# Altium footprint library JEDEC.PcbLib: 40 footprints (part 1 of 3)
Each footprint in its own frame and in the unit in brackets; x right, y up, seen from the top. Pads: shape width x height; smd on the part's side, far side on the other; paste and mask are expansions set on the pad; w line width, h text height; cw(c..) or ccw(c..) is an arc to the next point about the centre after c.
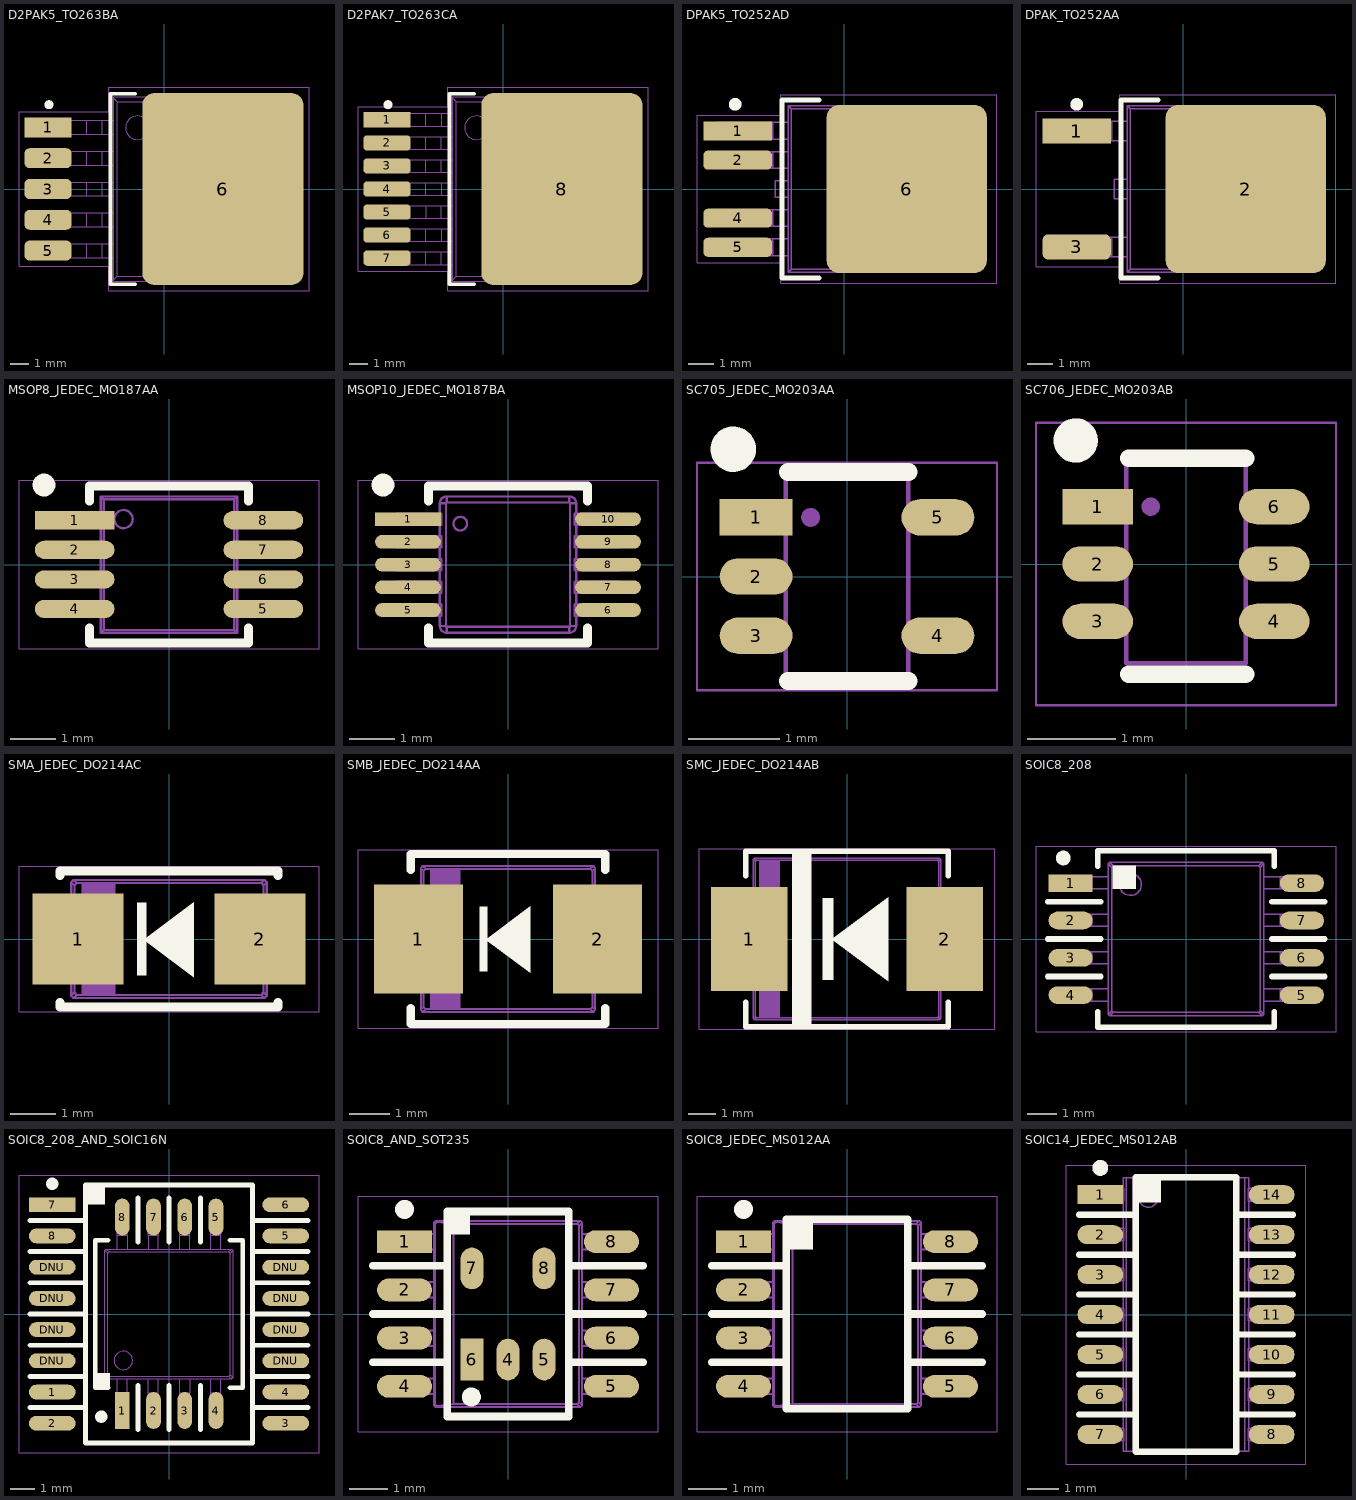
[diagram p0: the footprints below, top view; thin cyan lines are the x and y axes]

## D2PAK5_TO263BA [mm] "D2-PAK, 6-Pads, Body 7.80x8.61mm (max)"
height 4.825
pads (6):
  rect 2.6x1.1 smd: 1(-6.4,3.4)
  rrect50% 2.6x1.1 smd: 2(-6.4,1.7) 3(-6.4,0) 4(-6.4,-1.7) 5(-6.4,-3.4)
  rrect15% 8.9x10.6 smd paste-10: 6(3.25,0)
Top Overlay:
  circle w0.25: c-6.35,4.65 r0.125
  lines w0.2: -1.6,-5.25 -2.95,-5.25 -2.95,5.25 -1.6,5.25
Top Paste:
  rectangle: -0.7,0.9 0.3,1.9
  rectangle: -0.7,-0.5 0.3,0.5
  region: 0.7,0.5 0.7,-0.5 1.7,-0.5 1.7,0.5
  region: 0.7,1.9 0.7,0.9 1.7,0.9 1.7,1.9
  region: 2.1,1.9 2.1,0.9 3.1,0.9 3.1,1.9
  region: 2.1,0.5 2.1,-0.5 3.1,-0.5 3.1,0.5
  region: 3.5,1.9 3.5,0.9 4.5,0.9 4.5,1.9
  region: 3.5,0.5 3.5,-0.5 4.5,-0.5 4.5,0.5
  region: 4.9,1.9 4.9,0.9 5.9,0.9 5.9,1.9
  region: 4.9,0.5 4.9,-0.5 5.9,-0.5 5.9,0.5
  region: 6.3,1.9 6.3,0.9 7.3,0.9 7.3,1.9
  region: 6.3,0.5 6.3,-0.5 7.3,-0.5 7.3,0.5
  rectangle: -0.7,2.3 0.3,3.3
  region: 0.7,3.3 0.7,2.3 1.7,2.3 1.7,3.3
  region: 2.1,3.3 2.1,2.3 3.1,2.3 3.1,3.3
  region: 3.5,3.3 3.5,2.3 4.5,2.3 4.5,3.3
  region: 4.9,3.3 4.9,2.3 5.9,2.3 5.9,3.3
  region: 6.3,3.3 6.3,2.3 7.3,2.3 7.3,3.3
  rectangle: -0.7,3.7 0.3,4.7
  region: 0.7,4.7 0.7,3.7 1.7,3.7 1.7,4.7
  region: 2.1,4.7 2.1,3.7 3.1,3.7 3.1,4.7
  region: 3.5,4.7 3.5,3.7 4.5,3.7 4.5,4.7
  region: 4.9,4.7 4.9,3.7 5.9,3.7 5.9,4.7
  region: 6.3,4.7 6.3,3.7 7.3,3.7 7.3,4.7
  region: 7.3,-0.9 6.3,-0.9 6.3,-1.9 7.3,-1.9
  region: 5.9,-1.9 5.9,-0.9 4.9,-0.9 4.9,-1.9
  region: 4.5,-1.9 4.5,-0.9 3.5,-0.9 3.5,-1.9
  region: 3.1,-1.9 3.1,-0.9 2.1,-0.9 2.1,-1.9
  region: 1.7,-1.9 1.7,-0.9 0.7,-0.9 0.7,-1.9
  region: 0.3,-1.9 0.3,-0.9 -0.7,-0.9 -0.7,-1.9
  region: 7.3,-2.3 6.3,-2.3 6.3,-3.3 7.3,-3.3
  region: 5.9,-3.3 5.9,-2.3 4.9,-2.3 4.9,-3.3
  region: 4.5,-3.3 4.5,-2.3 3.5,-2.3 3.5,-3.3
  region: 3.1,-3.3 3.1,-2.3 2.1,-2.3 2.1,-3.3
  region: 1.7,-3.3 1.7,-2.3 0.7,-2.3 0.7,-3.3
  region: 0.3,-3.3 0.3,-2.3 -0.7,-2.3 -0.7,-3.3
  region: 7.3,-3.7 6.3,-3.7 6.3,-4.7 7.3,-4.7
  region: 5.9,-4.7 5.9,-3.7 4.9,-3.7 4.9,-4.7
  region: 4.5,-4.7 4.5,-3.7 3.5,-3.7 3.5,-4.7
  region: 3.1,-4.7 3.1,-3.7 2.1,-3.7 2.1,-4.7
  region: 1.7,-4.7 1.7,-3.7 0.7,-3.7 0.7,-4.7
  region: 0.3,-4.7 0.3,-3.7 -0.7,-3.7 -0.7,-4.7
Top Courtyard:
  lines w0.025: -8,-4.25 -8,4.25 -3.05,4.25 -3.05,5.6 8,5.6 8,-5.6 -3.05,-5.6 -3.05,-4.25 -8,-4.25
Top Assembly:
  circle w0.05: c-1.473,3.378 r0.65
  lines w0.05: -5.883,-3.785 -5.883,-3.023 ; -5.883,-2.083 -5.883,-1.321 ; -5.883,-0.381 -5.883,0.381 ; -5.883,1.321 -5.883,2.083 ; -5.883,3.023 -5.883,3.785 ; -5.485,-3.785 -5.485,-3.023 ; -5.485,-2.083 -5.485,-1.321 ; -5.485,-0.381 -5.485,0.381 ; -5.485,1.321 -5.485,2.083 ; -5.485,3.023 -5.485,3.785 ; -4.267,-3.785 -4.267,-3.023 ; -4.267,-2.083 -4.267,-1.321 ; -4.267,-0.381 -4.267,0.381 ; -4.267,1.321 -4.267,2.083 ; -4.267,3.023 -4.267,3.785 ; -3.401,-3.785 -3.401,-3.023 ; -3.401,-2.083 -3.401,-1.321 ; -3.401,-0.381 -3.401,0.381 ; -3.401,1.321 -3.401,2.083 ; -3.401,3.023 -3.401,3.785 ; -2.773,-5.003 -2.586,-4.816 ; -2.773,-3.785 -7.322,-3.785 -7.322,-3.023 -2.773,-3.023 ; -2.773,-2.083 -7.322,-2.083 -7.322,-1.321 -2.773,-1.321 ; -2.773,-0.381 -7.322,-0.381 -7.322,0.381 -2.773,0.381 ; -2.773,1.321 -7.322,1.321 -7.322,2.083 -2.773,2.083 ; -2.773,3.023 -7.322,3.023 -7.322,3.785 -2.773,3.785 ; -2.773,5.003 -2.586,4.816 ; 6.242,-4.666 6.722,-4.666 7.322,-3.766 7.322,3.766 6.722,4.666 6.242,4.666 ; -2.586,-4.816 5.759,-4.816 ; -2.586,-4.816 -2.586,4.816 ; -2.586,4.816 5.759,4.816 ; 5.759,-4.816 6.023,-5.08 ; 5.759,-4.816 5.759,4.816 ; 5.759,4.816 6.023,5.08 ; 6.023,-5.08 6.242,-4.861 6.242,4.861 6.023,5.08 ; 6.023,-5.08 -2.773,-5.08 -2.773,5.08 6.023,5.08
  text ".Designator" at -5.862,-0.676 h3
3D body "D2PAK5_TO263BA.x_t": height 4.83, standoff 0, extent -7.257,-5.08 7.387,5.08

## D2PAK7_TO263CA [mm] "D2-PAK, 8-Pads, Body 7.80x8.61mm (max)"
height 4.825
pads (8):
  rect 2.6x0.85 smd: 1(-6.4,3.81)
  rrect50% 2.6x0.85 smd: 2(-6.4,2.54) 3(-6.4,1.27) 4(-6.4,0) 5(-6.4,-1.27) 6(-6.4,-2.54) 7(-6.4,-3.81)
  rrect15% 8.9x10.6 smd paste-10: 8(3.25,0)
Top Overlay:
  circle w0.25: c-6.35,4.65 r0.125
  lines w0.2: -1.6,-5.25 -2.95,-5.25 -2.95,5.25 -1.6,5.25
Top Paste:
  region: 0.3,-4.7 0.3,-3.7 -0.7,-3.7 -0.7,-4.7
  region: 1.7,-4.7 1.7,-3.7 0.7,-3.7 0.7,-4.7
  region: 3.1,-4.7 3.1,-3.7 2.1,-3.7 2.1,-4.7
  region: 4.5,-4.7 4.5,-3.7 3.5,-3.7 3.5,-4.7
  region: 5.9,-4.7 5.9,-3.7 4.9,-3.7 4.9,-4.7
  region: 7.3,-3.7 6.3,-3.7 6.3,-4.7 7.3,-4.7
  region: 0.3,-3.3 0.3,-2.3 -0.7,-2.3 -0.7,-3.3
  region: 1.7,-3.3 1.7,-2.3 0.7,-2.3 0.7,-3.3
  region: 3.1,-3.3 3.1,-2.3 2.1,-2.3 2.1,-3.3
  region: 4.5,-3.3 4.5,-2.3 3.5,-2.3 3.5,-3.3
  region: 5.9,-3.3 5.9,-2.3 4.9,-2.3 4.9,-3.3
  region: 7.3,-2.3 6.3,-2.3 6.3,-3.3 7.3,-3.3
  region: 0.3,-1.9 0.3,-0.9 -0.7,-0.9 -0.7,-1.9
  region: 1.7,-1.9 1.7,-0.9 0.7,-0.9 0.7,-1.9
  region: 3.1,-1.9 3.1,-0.9 2.1,-0.9 2.1,-1.9
  region: 4.5,-1.9 4.5,-0.9 3.5,-0.9 3.5,-1.9
  region: 5.9,-1.9 5.9,-0.9 4.9,-0.9 4.9,-1.9
  region: 7.3,-0.9 6.3,-0.9 6.3,-1.9 7.3,-1.9
  region: 6.3,4.7 6.3,3.7 7.3,3.7 7.3,4.7
  region: 4.9,4.7 4.9,3.7 5.9,3.7 5.9,4.7
  region: 3.5,4.7 3.5,3.7 4.5,3.7 4.5,4.7
  region: 2.1,4.7 2.1,3.7 3.1,3.7 3.1,4.7
  region: 0.7,4.7 0.7,3.7 1.7,3.7 1.7,4.7
  rectangle: -0.7,3.7 0.3,4.7
  region: 6.3,3.3 6.3,2.3 7.3,2.3 7.3,3.3
  region: 4.9,3.3 4.9,2.3 5.9,2.3 5.9,3.3
  region: 3.5,3.3 3.5,2.3 4.5,2.3 4.5,3.3
  region: 2.1,3.3 2.1,2.3 3.1,2.3 3.1,3.3
  region: 0.7,3.3 0.7,2.3 1.7,2.3 1.7,3.3
  rectangle: -0.7,2.3 0.3,3.3
  region: 6.3,0.5 6.3,-0.5 7.3,-0.5 7.3,0.5
  region: 6.3,1.9 6.3,0.9 7.3,0.9 7.3,1.9
  region: 4.9,0.5 4.9,-0.5 5.9,-0.5 5.9,0.5
  region: 4.9,1.9 4.9,0.9 5.9,0.9 5.9,1.9
  region: 3.5,0.5 3.5,-0.5 4.5,-0.5 4.5,0.5
  region: 3.5,1.9 3.5,0.9 4.5,0.9 4.5,1.9
  region: 2.1,0.5 2.1,-0.5 3.1,-0.5 3.1,0.5
  region: 2.1,1.9 2.1,0.9 3.1,0.9 3.1,1.9
  region: 0.7,1.9 0.7,0.9 1.7,0.9 1.7,1.9
  region: 0.7,0.5 0.7,-0.5 1.7,-0.5 1.7,0.5
  rectangle: -0.7,-0.5 0.3,0.5
  rectangle: -0.7,0.9 0.3,1.9
Top Courtyard:
  lines w0.025: -8,-4.55 -3.05,-4.55 -3.05,-5.6 8,-5.6 8,5.6 -3.05,5.6 -3.05,4.55 -8,4.55 -8,-4.55
Top Assembly:
  circle w0.05: c-1.473,3.378 r0.65
  lines w0.05: -5.883,-4.166 -5.883,-3.454 ; -5.883,-2.896 -5.883,-2.184 ; -5.883,-1.626 -5.883,-0.914 ; -5.883,-0.356 -5.883,0.356 ; -5.883,0.914 -5.883,1.626 ; -5.883,2.184 -5.883,2.896 ; -5.883,3.454 -5.883,4.166 ; -5.485,-4.166 -5.485,-3.454 ; -5.485,-2.896 -5.485,-2.184 ; -5.485,-1.626 -5.485,-0.914 ; -5.485,-0.356 -5.485,0.356 ; -5.485,0.914 -5.485,1.626 ; -5.485,2.184 -5.485,2.896 ; -5.485,3.454 -5.485,4.166 ; -4.267,-4.166 -4.267,-3.455 ; -4.267,-2.896 -4.267,-2.184 ; -4.267,-1.626 -4.267,-0.914 ; -4.267,-0.356 -4.267,0.356 ; -4.267,0.914 -4.267,1.626 ; -4.267,2.184 -4.267,2.895 ; -4.267,3.454 -4.267,4.166 ; -3.401,-4.166 -3.401,-3.454 ; -3.401,-2.896 -3.401,-2.185 ; -3.401,-1.626 -3.401,-0.914 ; -3.401,-0.356 -3.401,0.356 ; -3.401,0.914 -3.401,1.626 ; -3.401,2.184 -3.401,2.896 ; -3.401,3.454 -3.401,4.166 ; -2.773,-5.003 -2.586,-4.816 ; -2.773,-4.166 -7.322,-4.166 -7.322,-3.454 -2.773,-3.454 ; -2.773,-2.895 -7.322,-2.896 -7.322,-2.184 -2.773,-2.185 ; -2.773,-1.626 -7.322,-1.626 -7.322,-0.914 -2.773,-0.914 ; -2.773,-0.356 -7.322,-0.356 -7.322,0.356 -2.773,0.356 ; -2.773,0.914 -7.322,0.914 -7.322,1.626 -2.773,1.626 ; -2.773,2.184 -7.322,2.184 -7.322,2.895 -2.773,2.896 ; -2.773,3.454 -7.322,3.454 -7.322,4.166 -2.773,4.166 ; -2.773,5.003 -2.586,4.816 ; 6.242,-4.666 6.722,-4.666 7.322,-3.766 7.322,3.766 6.722,4.666 6.242,4.666 ; -2.586,-4.816 -2.586,4.816 ; -2.586,-4.816 5.759,-4.816 ; -2.586,4.816 5.759,4.816 ; 5.759,-4.816 5.759,4.816 ; 5.759,-4.816 6.023,-5.08 ; 5.759,4.816 6.023,5.08 ; 6.023,-5.08 -2.773,-5.08 -2.773,5.08 6.023,5.08 ; 6.023,-5.08 6.242,-4.861 6.242,4.861 6.023,5.08
  text ".Designator" at -5.862,-0.676 h3
3D body "D2PAK7_TO263CA.x_t": height 4.83, standoff 0, extent -7.257,-5.08 7.387,5.08

## DPAK5_TO252AD [mm] "D-PAK, 5-Pads, Body 6.15x6.66mm (max)"
height 2.388
pads (5):
  rect 2.7x0.75 smd paste+0 mask+0.05: 1(-4.2,2.28)
  rrect50% 2.7x0.75 smd paste+0 mask+0.05: 2(-4.2,1.137) 4(-4.2,-1.149) 5(-4.2,-2.292)
  rrect15% 6.3x6.6 smd paste-50 mask+0.05: 6(2.45,0)
Top Overlay:
  circle w0.25: c-4.3,3.33 r0.125
  lines w0.2: -1,-3.5 -2.45,-3.5 -2.45,3.5 -1,3.5
Top Paste:
  region: 0.293,2.5 0.293,3.1 -0.307,3.1 -0.307,2.5
  region: 0.293,1.7 0.293,2.3 -0.307,2.3 -0.307,1.7
  region: 1.093,2.5 1.093,3.1 0.493,3.1 0.493,2.5
  region: 1.093,1.7 1.093,2.3 0.493,2.3 0.493,1.7
  region: 1.893,2.5 1.893,3.1 1.293,3.1 1.293,2.5
  region: 1.893,1.7 1.893,2.3 1.293,2.3 1.293,1.7
  region: 2.693,2.5 2.693,3.1 2.093,3.1 2.093,2.5
  region: 2.693,1.7 2.693,2.3 2.093,2.3 2.093,1.7
  region: 3.493,2.5 3.493,3.1 2.893,3.1 2.893,2.5
  region: 3.493,1.7 3.493,2.3 2.893,2.3 2.893,1.7
  region: 4.293,2.5 4.293,3.1 3.693,3.1 3.693,2.5
  region: 4.293,1.7 4.293,2.3 3.693,2.3 3.693,1.7
  region: 5.093,2.5 5.093,3.1 4.493,3.1 4.493,2.5
  region: 5.093,1.7 5.093,2.3 4.493,2.3 4.493,1.7
  region: 0.293,0.9 0.293,1.5 -0.307,1.5 -0.307,0.9
  region: 1.093,0.9 1.093,1.5 0.493,1.5 0.493,0.9
  region: 1.893,0.9 1.893,1.5 1.293,1.5 1.293,0.9
  region: 2.693,0.9 2.693,1.5 2.093,1.5 2.093,0.9
  region: 3.493,0.9 3.493,1.5 2.893,1.5 2.893,0.9
  region: 4.293,0.9 4.293,1.5 3.693,1.5 3.693,0.9
  region: 5.093,0.9 5.093,1.5 4.493,1.5 4.493,0.9
  region: 0.293,0.1 0.293,0.7 -0.307,0.7 -0.307,0.1
  region: 1.093,0.1 1.093,0.7 0.493,0.7 0.493,0.1
  region: 1.893,0.1 1.893,0.7 1.293,0.7 1.293,0.1
  region: 2.693,0.1 2.693,0.7 2.093,0.7 2.093,0.1
  region: 3.493,0.1 3.493,0.7 2.893,0.7 2.893,0.1
  region: 4.293,0.1 4.293,0.7 3.693,0.7 3.693,0.1
  region: 5.093,0.1 5.093,0.7 4.493,0.7 4.493,0.1
  region: 0.293,-0.7 0.293,-0.1 -0.307,-0.1 -0.307,-0.7
  region: 1.093,-0.7 1.093,-0.1 0.493,-0.1 0.493,-0.7
  region: 1.893,-0.7 1.893,-0.1 1.293,-0.1 1.293,-0.7
  region: 2.693,-0.7 2.693,-0.1 2.093,-0.1 2.093,-0.7
  region: 3.493,-0.7 3.493,-0.1 2.893,-0.1 2.893,-0.7
  region: 4.293,-0.7 4.293,-0.1 3.693,-0.1 3.693,-0.7
  region: 5.093,-0.7 5.093,-0.1 4.493,-0.1 4.493,-0.7
  region: 0.293,-1.5 0.293,-0.9 -0.307,-0.9 -0.307,-1.5
  region: 1.093,-1.5 1.093,-0.9 0.493,-0.9 0.493,-1.5
  region: 1.893,-1.5 1.893,-0.9 1.293,-0.9 1.293,-1.5
  region: 2.693,-1.5 2.693,-0.9 2.093,-0.9 2.093,-1.5
  region: 3.493,-1.5 3.493,-0.9 2.893,-0.9 2.893,-1.5
  region: 4.293,-1.5 4.293,-0.9 3.693,-0.9 3.693,-1.5
  region: 5.093,-1.5 5.093,-0.9 4.493,-0.9 4.493,-1.5
  region: 0.293,-2.3 0.293,-1.7 -0.307,-1.7 -0.307,-2.3
  region: 1.093,-2.3 1.093,-1.7 0.493,-1.7 0.493,-2.3
  region: 1.893,-2.3 1.893,-1.7 1.293,-1.7 1.293,-2.3
  region: 2.693,-2.3 2.693,-1.7 2.093,-1.7 2.093,-2.3
  region: 3.493,-2.3 3.493,-1.7 2.893,-1.7 2.893,-2.3
  region: 4.293,-2.3 4.293,-1.7 3.693,-1.7 3.693,-2.3
  region: 5.093,-2.3 5.093,-1.7 4.493,-1.7 4.493,-2.3
  region: 0.293,-3.1 0.293,-2.5 -0.307,-2.5 -0.307,-3.1
  region: 1.093,-3.1 1.093,-2.5 0.493,-2.5 0.493,-3.1
  region: 1.893,-3.1 1.893,-2.5 1.293,-2.5 1.293,-3.1
  region: 2.693,-3.1 2.693,-2.5 2.093,-2.5 2.093,-3.1
  region: 3.493,-3.1 3.493,-2.5 2.893,-2.5 2.893,-3.1
  region: 4.293,-3.1 4.293,-2.5 3.693,-2.5 3.693,-3.1
  region: 5.093,-3.1 5.093,-2.5 4.493,-2.5 4.493,-3.1
Top Courtyard:
  lines w0.025: -5.8,-2.9 -5.8,2.9 -2.5,2.9 -2.5,3.7 6,3.7 6,-3.7 -2.5,-3.7 -2.5,-2.9 -5.8,-2.9
Top Assembly:
  lines w0.05: -3.973,-2.616 -3.973,-1.956 ; -3.973,-1.473 -3.973,-0.813 ; -3.973,0.813 -3.973,1.473 ; -3.973,1.956 -3.973,2.616 ; -3.782,-2.616 -3.782,-1.956 ; -3.782,-1.473 -3.782,-0.813 ; -3.782,0.813 -3.782,1.473 ; -3.782,1.956 -3.782,2.616 ; -3.246,-2.616 -3.246,-1.956 ; -3.246,-1.473 -3.246,-0.813 ; -3.246,0.813 -3.246,1.473 ; -3.246,1.956 -3.246,2.616 ; -2.824,-2.616 -2.824,-1.956 ; -2.824,-1.473 -2.824,-0.813 ; -2.824,0.813 -2.824,1.473 ; -2.824,1.956 -2.824,2.616 ; -2.217,-2.616 -4.96,-2.616 -4.96,-1.956 -2.217,-1.956 ; -2.217,-1.473 -4.96,-1.473 -4.96,-0.813 -2.217,-0.813 ; -2.217,-0.33 -2.717,-0.33 -2.717,0.33 -2.217,0.33 ; -2.217,0.813 -4.96,0.813 -4.96,1.473 -2.217,1.473 ; -2.217,1.956 -4.96,1.956 -4.96,2.616 -2.217,2.616 ; 3.879,-2.73 4.759,-2.73 ccw(c4.759,-2.531) 4.959,-2.531 4.959,2.531 ccw(c4.759,2.531) 4.759,2.731 3.879,2.73 ; -2.217,-3.27 -2.217,3.27 ; -2.217,-3.27 -2.097,-3.151 ; -2.217,-3.27 3.879,-3.27 ; -2.217,3.27 3.879,3.27 ; -2.217,3.27 -2.097,3.151 ; -2.097,-3.151 -2.097,3.151 ; -2.097,-3.151 3.76,-3.151 ; -2.097,3.151 3.76,3.151 ; 3.76,-3.151 3.879,-3.27 ; 3.76,-3.151 3.76,3.151 ; 3.76,3.151 3.879,3.27 ; 3.879,-3.27 3.879,3.27
  text ".Designator" at -5.931,-0.679 h3
3D body "DPAK5_TO252AD.x_t": height 2.39, standoff -0.01, extent -4.966,-3.27 4.953,3.27

## DPAK_TO252AA [mm] "D-PAK, 3-Pads, Body 6.15x6.66mm (max)"
height 2.388
pads (3):
  rect 2.7x1 smd paste+0 mask+0.05: 1(-4.2,2.28)
  rrect15% 6.3x6.6 smd paste-50 mask+0.05: 2(2.45,0)
  rrect50% 2.7x1 smd paste+0 mask+0.05: 3(-4.2,-2.28)
Top Overlay:
  circle w0.25: c-4.2,3.33 r0.125
  lines w0.2: -1,-3.5 -2.45,-3.5 -2.45,3.5 -1,3.5
Top Paste:
  region: 5.193,-3.1 5.193,-2.5 4.593,-2.5 4.593,-3.1
  region: 4.393,-3.1 4.393,-2.5 3.793,-2.5 3.793,-3.1
  region: 3.593,-3.1 3.593,-2.5 2.993,-2.5 2.993,-3.1
  region: 2.793,-3.1 2.793,-2.5 2.193,-2.5 2.193,-3.1
  region: 1.993,-3.1 1.993,-2.5 1.393,-2.5 1.393,-3.1
  region: 1.193,-3.1 1.193,-2.5 0.593,-2.5 0.593,-3.1
  region: 0.393,-3.1 0.393,-2.5 -0.207,-2.5 -0.207,-3.1
  region: 5.193,-2.3 5.193,-1.7 4.593,-1.7 4.593,-2.3
  region: 4.393,-2.3 4.393,-1.7 3.793,-1.7 3.793,-2.3
  region: 3.593,-2.3 3.593,-1.7 2.993,-1.7 2.993,-2.3
  region: 2.793,-2.3 2.793,-1.7 2.193,-1.7 2.193,-2.3
  region: 1.993,-2.3 1.993,-1.7 1.393,-1.7 1.393,-2.3
  region: 1.193,-2.3 1.193,-1.7 0.593,-1.7 0.593,-2.3
  region: 0.393,-2.3 0.393,-1.7 -0.207,-1.7 -0.207,-2.3
  region: 5.193,-1.5 5.193,-0.9 4.593,-0.9 4.593,-1.5
  region: 4.393,-1.5 4.393,-0.9 3.793,-0.9 3.793,-1.5
  region: 3.593,-1.5 3.593,-0.9 2.993,-0.9 2.993,-1.5
  region: 2.793,-1.5 2.793,-0.9 2.193,-0.9 2.193,-1.5
  region: 1.993,-1.5 1.993,-0.9 1.393,-0.9 1.393,-1.5
  region: 1.193,-1.5 1.193,-0.9 0.593,-0.9 0.593,-1.5
  region: 0.393,-1.5 0.393,-0.9 -0.207,-0.9 -0.207,-1.5
  region: 5.193,-0.7 5.193,-0.1 4.593,-0.1 4.593,-0.7
  region: 4.393,-0.7 4.393,-0.1 3.793,-0.1 3.793,-0.7
  region: 3.593,-0.7 3.593,-0.1 2.993,-0.1 2.993,-0.7
  region: 2.793,-0.7 2.793,-0.1 2.193,-0.1 2.193,-0.7
  region: 1.993,-0.7 1.993,-0.1 1.393,-0.1 1.393,-0.7
  region: 1.193,-0.7 1.193,-0.1 0.593,-0.1 0.593,-0.7
  region: 0.393,-0.7 0.393,-0.1 -0.207,-0.1 -0.207,-0.7
  region: 5.193,0.1 5.193,0.7 4.593,0.7 4.593,0.1
  region: 4.393,0.1 4.393,0.7 3.793,0.7 3.793,0.1
  region: 3.593,0.1 3.593,0.7 2.993,0.7 2.993,0.1
  region: 2.793,0.1 2.793,0.7 2.193,0.7 2.193,0.1
  region: 1.993,0.1 1.993,0.7 1.393,0.7 1.393,0.1
  region: 1.193,0.1 1.193,0.7 0.593,0.7 0.593,0.1
  region: 0.393,0.1 0.393,0.7 -0.207,0.7 -0.207,0.1
  region: 5.193,0.9 5.193,1.5 4.593,1.5 4.593,0.9
  region: 4.393,0.9 4.393,1.5 3.793,1.5 3.793,0.9
  region: 3.593,0.9 3.593,1.5 2.993,1.5 2.993,0.9
  region: 2.793,0.9 2.793,1.5 2.193,1.5 2.193,0.9
  region: 1.993,0.9 1.993,1.5 1.393,1.5 1.393,0.9
  region: 1.193,0.9 1.193,1.5 0.593,1.5 0.593,0.9
  region: 0.393,0.9 0.393,1.5 -0.207,1.5 -0.207,0.9
  region: 5.193,1.7 5.193,2.3 4.593,2.3 4.593,1.7
  region: 5.193,2.5 5.193,3.1 4.593,3.1 4.593,2.5
  region: 4.393,1.7 4.393,2.3 3.793,2.3 3.793,1.7
  region: 4.393,2.5 4.393,3.1 3.793,3.1 3.793,2.5
  region: 3.593,1.7 3.593,2.3 2.993,2.3 2.993,1.7
  region: 3.593,2.5 3.593,3.1 2.993,3.1 2.993,2.5
  region: 2.793,1.7 2.793,2.3 2.193,2.3 2.193,1.7
  region: 2.793,2.5 2.793,3.1 2.193,3.1 2.193,2.5
  region: 1.993,1.7 1.993,2.3 1.393,2.3 1.393,1.7
  region: 1.993,2.5 1.993,3.1 1.393,3.1 1.393,2.5
  region: 1.193,1.7 1.193,2.3 0.593,2.3 0.593,1.7
  region: 1.193,2.5 1.193,3.1 0.593,3.1 0.593,2.5
  region: 0.393,1.7 0.393,2.3 -0.207,2.3 -0.207,1.7
  region: 0.393,2.5 0.393,3.1 -0.207,3.1 -0.207,2.5
Top Courtyard:
  lines w0.025: -5.8,-3.05 -2.5,-3.05 -2.5,-3.7 6,-3.7 6,3.7 -2.5,3.7 -2.5,3.05 -5.8,3.05 -5.8,-3.05
Top Assembly:
  lines w0.05: -3.973,-2.667 -3.973,-1.905 ; -3.973,1.905 -3.973,2.667 ; -3.782,-2.667 -3.782,-1.905 ; -3.782,1.905 -3.782,2.667 ; -3.246,-2.667 -3.246,-1.905 ; -3.246,1.905 -3.246,2.667 ; -2.824,-2.667 -2.824,-1.905 ; -2.824,1.905 -2.824,2.667 ; -2.217,-2.667 -4.959,-2.667 -4.959,-1.905 -2.217,-1.905 ; -2.217,-0.381 -2.725,-0.381 -2.725,0.381 -2.217,0.381 ; -2.217,1.905 -4.959,1.905 -4.959,2.667 -2.217,2.667 ; 3.879,-2.73 4.76,-2.73 ccw(c4.76,-2.531) 4.959,-2.531 4.959,2.531 ccw(c4.76,2.531) 4.76,2.73 3.879,2.73 ; -2.217,-3.27 3.879,-3.27 ; -2.217,-3.27 -2.097,-3.151 ; -2.217,-3.27 -2.217,3.27 ; -2.217,3.27 -2.097,3.151 ; -2.217,3.27 3.879,3.27 ; -2.097,-3.151 3.76,-3.151 ; -2.097,-3.151 -2.097,3.151 ; -2.097,3.151 3.76,3.151 ; 3.76,-3.151 3.879,-3.27 ; 3.76,-3.151 3.76,3.151 ; 3.76,3.151 3.879,3.27 ; 3.879,-3.27 3.879,3.27
  text ".Designator" at -5.931,-0.679 h3
3D body "DPAK_TO252AA.x_t": height 2.4, standoff 0, extent -4.966,-3.27 4.953,3.27

## MSOP8_JEDEC_MO187AA [mm] "MSOP, 8-Leads, Body 3.00x3.00mm, Pitch 0.65mm"
height 0.85
pads (8):
  rect 1.75x0.4 smd paste+0 mask+0.05: 1(-2.075,0.975)
  oval 1.75x0.4 smd paste+0 mask+0.05: 2(-2.075,0.325) 3(-2.075,-0.325) 4(-2.075,-0.975) 5(2.075,-0.975) 6(2.075,-0.325) 7(2.075,0.325) 8(2.075,0.975)
Top Overlay:
  circle w0.25: c-2.75,1.75 r0.125
  lines w0.2: -1.75,-1.4 -1.75,-1.725 1.75,-1.725 1.75,-1.4 ; -1.75,1.4 -1.75,1.725 1.75,1.725 1.75,1.4
Top Courtyard:
  lines w0.025: -3.3,-1.85 -3.3,1.85 3.3,1.85 3.3,-1.85 -3.3,-1.85
Top Assembly:
  circle w0.05: c-1,1 r0.2
  lines w0.05: -2.1,-1.125 -2.5,-1.125 -2.5,-0.825 -2.1,-0.825 ; -2.1,-1.125 -2.1,-0.825 ; -2.1,-1.125 -2,-1.125 ; -2.1,-0.825 -2,-0.825 ; -2.1,-0.475 -2.5,-0.475 -2.5,-0.175 -2.1,-0.175 ; -2.1,-0.475 -2.1,-0.175 ; -2.1,-0.475 -2,-0.475 ; -2.1,-0.175 -2,-0.175 ; -2.1,0.175 -2.5,0.175 -2.5,0.475 -2.1,0.475 ; -2.1,0.175 -2.1,0.475 ; -2.1,0.175 -2,0.175 ; -2.1,0.475 -2,0.475 ; -2.1,0.825 -2.5,0.825 -2.5,1.125 -2.1,1.125 ; -2.1,0.825 -2.1,1.125 ; -2.1,0.825 -2,0.825 ; -2.1,1.125 -2,1.125 ; -2,-1.125 -2,-0.825 ; -2,-1.125 -1.8,-1.125 ; -2,-0.825 -1.8,-0.825 ; -2,-0.475 -2,-0.175 ; -2,-0.475 -1.8,-0.475 ; -2,-0.175 -1.8,-0.175 ; -2,0.175 -2,0.475 ; -2,0.175 -1.8,0.175 ; -2,0.475 -1.8,0.475 ; -2,0.825 -2,1.125 ; -2,0.825 -1.8,0.825 ; -2,1.125 -1.8,1.125 ; -1.8,-1.125 -1.5,-1.125 ; -1.8,-1.125 -1.8,-0.825 ; -1.8,-0.825 -1.5,-0.825 ; -1.8,-0.475 -1.5,-0.475 ; -1.8,-0.475 -1.8,-0.175 ; -1.8,-0.175 -1.5,-0.175 ; -1.8,0.175 -1.5,0.175 ; -1.8,0.175 -1.8,0.475 ; -1.8,0.475 -1.5,0.475 ; -1.8,0.825 -1.5,0.825 ; -1.8,0.825 -1.8,1.125 ; -1.8,1.125 -1.5,1.125 ; -1.5,-1.5 -1.5,-1.125 ; -1.5,-1.5 -1.438,-1.438 ; -1.5,-1.5 1.5,-1.5 ; -1.5,-1.125 -1.5,-0.825 ; -1.5,-0.825 -1.5,-0.475 ; -1.5,-0.475 -1.5,-0.175 ; -1.5,-0.175 -1.5,0.175 ; -1.5,0.175 -1.5,0.475 ; -1.5,0.475 -1.5,0.825 ; -1.5,0.825 -1.5,1.125 ; -1.5,1.125 -1.5,1.5 ; -1.5,1.5 -1.438,1.438 ; -1.5,1.5 1.5,1.5 ; -1.438,-1.438 -1.438,1.438 ; -1.438,-1.438 1.438,-1.438 ; -1.438,1.438 1.438,1.438 ; 1.438,-1.438 1.5,-1.5 ; 1.438,-1.438 1.438,1.438 ; 1.438,1.438 1.5,1.5 ; 1.5,-1.5 1.5,-1.125 ; 1.5,-1.125 1.5,-0.825 ; 1.5,-1.125 1.8,-1.125 ; 1.5,-0.825 1.5,-0.475 ; 1.5,-0.825 1.8,-0.825 ; 1.5,-0.475 1.5,-0.175 ; 1.5,-0.475 1.8,-0.475 ; 1.5,-0.175 1.8,-0.175 ; 1.5,-0.175 1.5,0.175 ; 1.5,0.175 1.5,0.475 ; 1.5,0.175 1.8,0.175 ; 1.5,0.475 1.5,0.825 ; 1.5,0.475 1.8,0.475 ; 1.5,0.825 1.5,1.125 ; 1.5,0.825 1.8,0.825 ; 1.5,1.125 1.5,1.5 ; 1.5,1.125 1.8,1.125 ; 1.8,-1.125 2,-1.125 ; 1.8,-1.125 1.8,-0.825 ; 1.8,-0.825 2,-0.825 ; 1.8,-0.475 2,-0.475 ; 1.8,-0.475 1.8,-0.175 ; 1.8,-0.175 2,-0.175 ; 1.8,0.175 2,0.175 ; 1.8,0.175 1.8,0.475 ; 1.8,0.475 2,0.475 ; 1.8,0.825 2,0.825 ; 1.8,0.825 1.8,1.125 ; 1.8,1.125 2,1.125 ; 2,-1.125 2,-0.825 ; 2,-1.125 2.1,-1.125 ; 2,-0.825 2.1,-0.825 ; 2,-0.475 2,-0.175 ; 2,-0.475 2.1,-0.475 ; 2,-0.175 2.1,-0.175 ; 2,0.175 2,0.475 ; 2,0.175 2.1,0.175 ; 2,0.475 2.1,0.475 ; 2,0.825 2,1.125 ; 2,0.825 2.1,0.825 ; 2,1.125 2.1,1.125 ; 2.1,-1.125 2.5,-1.125 2.5,-0.825 2.1,-0.825 ; 2.1,-1.125 2.1,-0.825 ; 2.1,-0.475 2.5,-0.475 2.5,-0.175 2.1,-0.175 ; 2.1,-0.475 2.1,-0.175 ; 2.1,0.175 2.5,0.175 2.5,0.475 2.1,0.475 ; 2.1,0.175 2.1,0.475 ; 2.1,0.825 2.5,0.825 2.5,1.125 2.1,1.125 ; 2.1,0.825 2.1,1.125
  text ".Designator" at -3.378,-0.339 h1.5
3D body "MSOP8_JEDEC_MO187AA.x_t": height 0.93, standoff 0, extent -2.45,-1.5 2.45,1.5

## MSOP10_JEDEC_MO187BA [mm] "MSOP, 10-Leads, Body 3.00x3.00mm, Pitch 0.5mm"
height 0.85
pads (10):
  rect 1.45x0.3 smd paste+0 mask+0.05: 1(-2.2,1)
  oval 1.45x0.3 smd paste+0 mask+0.05: 2(-2.2,0.5) 3(-2.2,0) 4(-2.2,-0.5) 5(-2.2,-1) 6(2.2,-1) 7(2.2,-0.5) 8(2.2,0) 9(2.2,0.5) 10(2.2,1)
Top Overlay:
  circle w0.25: c-2.75,1.75 r0.125
  lines w0.2: -1.75,-1.4 -1.75,-1.725 1.75,-1.725 1.75,-1.4 ; -1.75,1.4 -1.75,1.725 1.75,1.725 1.75,1.4
Top Courtyard:
  lines w0.025: -3.3,-1.85 3.3,-1.85 3.3,1.85 -3.3,1.85 -3.3,-1.85
Top Assembly:
  drawing of 195 lines, arcs and shapes, not listed
  text ".Designator" at -3.378,-0.339 h1.5
3D body "MSOP10_JEDEC_MO187BA.x_t": height 0.93, standoff 0, extent -2.45,-1.5 2.45,1.5

## SC705_JEDEC_MO203AA [mm] "SC70, 5-Leads, Body 1.25x2.00mm, Pitch 0.65mm"
height 0.9
pads (5):
  rect 0.8x0.4 smd paste+0 mask+0.05: 1(-1,0.65)
  oval 0.8x0.4 smd paste+0 mask+0.05: 2(-1,0) 3(-1,-0.65) 4(1,-0.65) 5(1,0.65)
Top Overlay:
  circle w0.25: c-1.25,1.4 r0.125
  lines w0.2: -0.65,-1.15 0.675,-1.15 ; -0.65,1.15 0.675,1.15
Top Courtyard:
  lines w0.025: -1.65,-1.25 -1.65,1.25 1.65,1.25 1.65,-1.25 -1.65,-1.25
Top Assembly:
  circle w0.05: c-0.4,0.65 r0.079
  region: -0.479,0.65 -0.479,0.634 -0.467,0.605 -0.445,0.583 -0.416,0.571 -0.4,0.571 -0.384,0.571 -0.355,0.583 -0.333,0.605 -0.321,0.634 -0.321,0.65 -0.321,0.666 -0.333,0.695 -0.355,0.717 -0.384,0.729 -0.4,0.729 -0.416,0.729 -0.445,0.717 -0.467,0.695 -0.479,0.666
  lines w0.05: -1.1,-0.775 -1.1,-0.525 ; -1.1,-0.125 -1.1,0.125 ; -1.1,0.525 -1.1,0.775 ; -0.8,-0.775 -0.8,-0.525 ; -0.8,-0.125 -0.8,0.125 ; -0.8,0.525 -0.8,0.775 ; -0.675,-0.775 -1.3,-0.775 -1.3,-0.525 -0.675,-0.525 ; -0.675,-0.125 -1.3,-0.125 -1.3,0.125 -0.675,0.125 ; -0.675,0.525 -1.3,0.525 -1.3,0.775 -0.675,0.775 ; 0.675,-0.775 1.3,-0.775 1.3,-0.525 0.675,-0.525 ; 0.675,0.525 1.3,0.525 1.3,0.775 0.675,0.775 ; 0.8,-0.775 0.8,-0.525 ; 0.8,0.525 0.8,0.775 ; 1.1,-0.775 1.1,-0.525 ; 1.1,0.525 1.1,0.775 ; -0.675,-1.125 -0.675,1.125 0.675,1.125 0.675,-1.125 -0.675,-1.125
  text ".Designator" at 0.226,-2.252 h1
3D body "SC705_JEDEC_MO203.x_t": height 0.95, standoff 0, extent -1.05,-1 1.05,1

## SC706_JEDEC_MO203AB [mm] "SC70, 6-Leads, Body 1.25x2.00mm, Pitch 0.65mm"
height 0.9
pads (6):
  rect 0.8x0.4 smd paste+0 mask+0.05: 1(-1,0.65)
  oval 0.8x0.4 smd paste+0 mask+0.05: 2(-1,0) 3(-1,-0.65) 4(1,-0.65) 5(1,0) 6(1,0.65)
Top Overlay:
  circle w0.25: c-1.25,1.4 r0.125
  lines w0.2: -0.65,-1.25 0.675,-1.25 ; -0.65,1.2 0.675,1.2
Top Courtyard:
  lines w0.025: -1.7,-1.6 1.7,-1.6 1.7,1.6 -1.7,1.6 -1.7,-1.6
Top Assembly:
  circle w0.05: c-0.4,0.65 r0.079
  region: -0.479,0.65 -0.479,0.634 -0.467,0.605 -0.445,0.583 -0.416,0.571 -0.4,0.571 -0.384,0.571 -0.355,0.583 -0.333,0.605 -0.321,0.634 -0.321,0.65 -0.321,0.666 -0.333,0.695 -0.355,0.717 -0.384,0.729 -0.4,0.729 -0.416,0.729 -0.445,0.717 -0.467,0.695 -0.479,0.666
  lines w0.05: -1.1,-0.775 -1.1,-0.525 ; -1.1,-0.125 -1.1,0.125 ; -1.1,0.525 -1.1,0.775 ; -0.8,-0.775 -0.8,-0.525 ; -0.8,-0.125 -0.8,0.125 ; -0.8,0.525 -0.8,0.775 ; -0.675,-0.775 -1.3,-0.775 -1.3,-0.525 -0.675,-0.525 ; -0.675,-0.125 -1.3,-0.125 -1.3,0.125 -0.675,0.125 ; -0.675,0.525 -1.3,0.525 -1.3,0.775 -0.675,0.775 ; 0.675,-0.775 1.3,-0.775 1.3,-0.525 0.675,-0.525 ; 0.675,-0.125 1.3,-0.125 1.3,0.125 0.675,0.125 ; 0.675,0.525 1.3,0.525 1.3,0.775 0.675,0.775 ; 0.8,-0.775 0.8,-0.525 ; 0.8,-0.125 0.8,0.125 ; 0.8,0.525 0.8,0.775 ; 1.1,-0.775 1.1,-0.525 ; 1.1,-0.125 1.1,0.125 ; 1.1,0.525 1.1,0.775 ; -0.675,-1.125 -0.675,1.125 0.675,1.125 0.675,-1.125 -0.675,-1.125
  text ".Designator" at 0.226,-2.252 h1
3D body "SC706_JEDEC_MO203.x_t": height 0.95, standoff 0, extent -1.05,-1 1.05,1

## SMA_JEDEC_DO214AC [mm] "DO-214AC, Body  2.6mm x 4.3mm"
height 2.9
pads (2):
  rect 2x2 smd paste-5: 1(-2,0) 2(2,0)
Top Overlay:
  rectangle: -0.7,-0.8 -0.5,0.8
  region: 0.55,0.812 -0.55,-0.013 0.55,-0.838
  lines w0.2: -2.4,-1.4 -2.4,-1.5 2.4,-1.5 2.4,-1.4 ; -2.4,1.4 -2.4,1.5 2.4,1.5 2.4,1.4
Top Paste:
  region: 3,-0.1 2.1,-0.1 2.1,-1 3,-1
  region: 3,1 2.1,1 2.1,0.1 3,0.1
  rectangle: 1,-1 1.9,-0.1
  rectangle: 1,0.1 1.9,1
  region: -1,-0.1 -1.9,-0.1 -1.9,-1 -1,-1
  region: -1,1 -1.9,1 -1.9,0.1 -1,0.1
  rectangle: -3,-1 -2.1,-0.1
  rectangle: -3,0.1 -2.1,1
Top Courtyard:
  lines w0.025: -3.3,-1.6 -3.3,1.6 3.3,1.6 3.3,-1.6 -3.3,-1.6
Top Assembly:
  lines w0.05: -2.3,-0.7 -2.3,0.7 ; -2.15,-0.7 -2.6,-0.7 -2.6,0.7 -2.15,0.7 ; -2.1,-1.3 -2.03,-1.23 ; -2.1,1.3 -2.03,1.23 ; -1.9,-1.23 -1.9,1.23 ; -1.85,-1.23 -1.85,1.23 ; -1.8,-1.23 -1.8,1.23 ; -1.75,-1.23 -1.75,1.23 ; -1.7,-1.23 -1.7,1.23 ; -1.65,-1.23 -1.65,1.23 ; -1.6,-1.23 -1.6,1.23 ; -1.55,-1.23 -1.55,1.23 ; -1.5,-1.23 -1.5,1.23 ; -1.45,-1.23 -1.45,1.23 ; -1.4,-1.23 -1.4,1.23 ; -1.35,-1.23 -1.35,1.23 ; -1.3,-1.23 -1.3,1.23 ; -1.25,-1.23 -1.25,1.23 ; -1.2,-1.23 -1.2,1.23 ; 2.1,-1.3 2.03,-1.23 ; 2.1,1.3 2.03,1.23 ; 2.15,-0.7 2.6,-0.7 2.6,0.7 2.15,0.7 ; 2.3,-0.7 2.3,0.7 ; -2.15,-1.25 -2.1,-1.3 2.1,-1.3 2.15,-1.25 ; -2.15,-1.25 -2.15,1.25 ; -2.15,-1.25 -2.08,-1.18 ; -2.15,1.25 -2.1,1.3 2.1,1.3 2.15,1.25 ; -2.15,1.25 -2.08,1.18 ; -2.08,-1.18 -2.08,1.18 ; -2.08,-1.18 -2.03,-1.23 ; -2.08,1.18 -2.03,1.23 ; -2.03,-1.23 2.03,-1.23 ; -2.03,1.23 2.03,1.23 ; 2.03,-1.23 2.08,-1.18 ; 2.03,1.23 2.08,1.18 ; 2.08,-1.18 2.15,-1.25 ; 2.08,-1.18 2.08,1.18 ; 2.08,1.18 2.15,1.25 ; 2.15,-1.25 2.15,1.25
  text ".Designator" at -3.378,-0.339 h1.5
3D body "SMA_DO214AC.x_t": height 2.6, standoff 0.1, extent -2.6,-1.3 2.6,1.3

## SMB_JEDEC_DO214AA [mm] "DO-214AA, Body  3.6mm x 4.3mm"
height 2.65
pads (2):
  rect 2.2x2.7 smd paste-5: 1(-2.21,0) 2(2.21,0)
Top Overlay:
  rectangle: -0.7,-0.8 -0.5,0.8
  region: 0.55,0.812 -0.55,-0.013 0.55,-0.838
  lines w0.2: -2.4,-1.7 -2.4,-2.1 2.4,-2.1 2.4,-1.7 ; -2.4,1.7 -2.4,2.1 2.4,2.1 2.4,1.7
Top Paste:
  rectangle: -3.3,-1.35 -2.3,-0.6
  region: -1.1,-0.6 -2.1,-0.6 -2.1,-1.35 -1.1,-1.35
  rectangle: -3.3,-0.4 -2.3,0.4
  rectangle: -3.3,0.6 -2.3,1.35
  region: -1.1,1.35 -2.1,1.35 -2.1,0.6 -1.1,0.6
  region: -1.1,0.4 -2.1,0.4 -2.1,-0.4 -1.1,-0.4
  region: 3.3,-0.6 2.3,-0.6 2.3,-1.35 3.3,-1.35
  rectangle: 1.1,-1.35 2.1,-0.6
  region: 3.3,0.4 2.3,0.4 2.3,-0.4 3.3,-0.4
  region: 3.3,1.35 2.3,1.35 2.3,0.6 3.3,0.6
  rectangle: 1.1,0.6 2.1,1.35
  rectangle: 1.1,-0.4 2.1,0.4
Top Courtyard:
  lines w0.025: -3.7,-2.2 3.7,-2.2 3.7,2.2 -3.7,2.2 -3.7,-2.2
Top Assembly:
  lines w0.05: -2.3,-1.025 -2.3,1.025 ; -2.15,-1.025 -2.6,-1.025 -2.6,1.025 -2.15,1.025 ; -2.1,-1.8 -2.03,-1.73 ; -2.1,1.8 -2.03,1.73 ; -1.9,-1.73 -1.9,1.73 ; -1.85,-1.73 -1.85,1.73 ; -1.8,-1.73 -1.8,1.73 ; -1.75,-1.73 -1.75,1.73 ; -1.7,-1.73 -1.7,1.73 ; -1.65,-1.73 -1.65,1.73 ; -1.6,-1.73 -1.6,1.73 ; -1.55,-1.73 -1.55,1.73 ; -1.5,-1.73 -1.5,1.73 ; -1.45,-1.73 -1.45,1.73 ; -1.4,-1.73 -1.4,1.73 ; -1.35,-1.73 -1.35,1.73 ; -1.3,-1.73 -1.3,1.73 ; -1.25,-1.73 -1.25,1.73 ; -1.2,-1.73 -1.2,1.73 ; 2.1,-1.8 2.03,-1.73 ; 2.1,1.8 2.03,1.73 ; 2.15,-1.025 2.6,-1.025 2.6,1.025 2.15,1.025 ; 2.3,-1.025 2.3,1.025 ; -2.15,-1.75 -2.08,-1.68 ; -2.15,-1.75 -2.15,1.75 ; -2.15,-1.75 -2.1,-1.8 2.1,-1.8 2.15,-1.75 ; -2.15,1.75 -2.08,1.68 ; -2.15,1.75 -2.1,1.8 2.1,1.8 2.15,1.75 ; -2.08,-1.68 -2.08,1.68 ; -2.08,-1.68 -2.03,-1.73 ; -2.08,1.68 -2.03,1.73 ; -2.03,-1.73 2.03,-1.73 ; -2.03,1.73 2.03,1.73 ; 2.03,-1.73 2.08,-1.68 ; 2.03,1.73 2.08,1.68 ; 2.08,-1.68 2.08,1.68 ; 2.08,-1.68 2.15,-1.75 ; 2.08,1.68 2.15,1.75 ; 2.15,-1.75 2.15,1.75
  text ".Designator" at -4.511,-0.453 h2
3D body "SMB_DO214AA.x_t": height 2.5, standoff 0, extent -2.6,-1.8 2.6,1.8

## SMC_JEDEC_DO214AB [mil] "DO-214AB, Body  5.9mm x 6.85mm"
height 104.33
pads (2):
  rect 110x150 smd paste-196.85: 1(-140.49,0) 2(140.49,0)
Top Overlay:
  rectangle: -35.43,-59.06 -19.68,59.06
  rectangle: -78.74,-125.98 -51.18,125.98
  region: 59.06,60.04 -21.65,-0.49 59.06,-61.02
  lines w7.87: -145.67,-90.55 -145.67,-125.98 145.67,-125.98 145.67,-90.55 ; -145.67,90.55 -145.67,125.98 145.67,125.98 145.67,90.55
Top Paste:
  region: -89.31,66.93 -136.55,66.93 -136.55,27.56 -89.31,27.56
  rectangle: -191.67,27.56 -144.43,66.93
  region: -89.31,19.69 -136.55,19.69 -136.55,-19.68 -89.31,-19.68
  rectangle: -191.67,-19.68 -144.43,19.69
  region: -89.31,-27.56 -136.55,-27.56 -136.55,-66.93 -89.31,-66.93
  rectangle: -191.67,-66.93 -144.43,-27.56
  rectangle: 89.31,27.56 136.56,66.93
  region: 191.67,66.93 144.43,66.93 144.43,27.56 191.67,27.56
  rectangle: 89.31,-19.68 136.56,19.69
  region: 191.67,19.69 144.43,19.69 144.43,-19.68 191.67,-19.68
  rectangle: 89.31,-66.93 136.56,-27.56
  region: 191.67,-27.56 144.43,-27.56 144.43,-66.93 191.67,-66.93
Top Courtyard:
  lines w0.98: -212.6,-129.92 -212.6,129.92 212.6,129.92 212.6,-129.92 -212.6,-129.92
Top Assembly:
  lines w1.97: -144.69,-59.06 -144.69,59.06 ; -134.84,-59.06 -156.5,-59.06 -156.5,59.06 -134.84,59.06 ; -125,-113.39 -125,113.39 ; -123.03,-113.39 -123.03,113.39 ; -121.06,-113.39 -121.06,113.39 ; -119.09,-113.39 -119.09,113.39 ; -117.13,-113.39 -117.13,113.39 ; -115.16,-113.39 -115.16,113.39 ; -113.19,-113.39 -113.19,113.39 ; -111.22,-113.39 -111.22,113.39 ; -109.25,-113.39 -109.25,113.39 ; -107.28,-113.39 -107.28,113.39 ; -105.31,-113.39 -105.31,113.39 ; -103.35,-113.39 -103.35,113.39 ; -101.38,-113.39 -101.38,113.39 ; -99.41,-113.39 -99.41,113.39 ; -97.44,-113.39 -97.44,113.39 ; 134.84,-59.06 156.5,-59.06 156.5,59.06 134.84,59.06 ; 144.69,-59.06 144.69,59.06 ; -134.84,-114.17 -132.87,-116.14 ; -134.84,-114.17 -134.84,114.17 ; -134.84,-114.16 -132.09,-111.41 ; -134.84,114.17 -132.87,116.14 ; -134.84,114.17 -132.09,111.42 ; -132.87,-116.14 132.87,-116.14 ; -132.87,-116.14 -130.12,-113.39 ; -132.87,116.14 132.87,116.14 ; -132.86,116.14 -130.11,113.39 ; -132.09,-111.41 -132.09,111.42 ; -132.09,-111.41 -130.12,-113.39 ; -132.09,111.42 -130.11,113.39 ; -130.12,-113.39 130.12,-113.39 ; -130.11,113.39 130.11,113.39 ; 130.12,-113.39 132.87,-116.14 ; 130.12,-113.39 132.09,-111.41 ; 130.11,113.39 132.09,111.42 ; 130.11,113.39 132.86,116.14 ; 132.09,-111.41 134.84,-114.16 ; 132.09,-111.41 132.09,111.42 ; 132.09,111.42 134.84,114.17 ; 132.87,-116.14 134.84,-114.17 ; 132.87,116.14 134.84,114.17 ; 134.84,-114.17 134.84,114.17
  text ".Designator" at -177.58,-17.82 h78.74
3D body "SMC_DO214AB.x_t": height 98.43, standoff -0.1, extent -156.49,-116.14 156.5,116.15

## SOIC8_208 [mm] "SOIC, 8-Leads, Body 5.28x5.21mm, Pitch 1.27mm"
height 1.88
pads (8):
  rect 1.5x0.6 smd paste+0 mask+0.05: 1(-3.925,1.9)
  oval 1.5x0.6 smd paste+0 mask+0.05: 2(-3.925,0.63) 3(-3.925,-0.64) 4(-3.925,-1.91) 5(3.943,-1.91) 6(3.943,-0.64) 7(3.943,0.63) 8(3.943,1.9)
Top Overlay:
  circle w0.25: c-4.175,2.755 r0.125
  rectangle: -2.5,1.7 -1.7,2.5
  lines w0.2: -4.7,-1.275 -2.9,-1.275 ; -4.7,-0.005 -2.9,-0.005 ; -4.7,1.265 -2.9,1.265 ; -3,-2.475 -3,-3 3,-3 3,-2.475 ; -3,2.475 -3,3 3,3 3,2.475 ; 2.918,-1.275 4.718,-1.275 ; 2.918,-0.005 4.718,-0.005 ; 2.918,1.265 4.718,1.265
Top Courtyard:
  lines w0.025: -5.1,-3.15 5.1,-3.15 5.1,3.15 -5.1,3.15 -5.1,-3.15
Top Assembly:
  drawing of 169 lines, arcs and shapes, not listed
  text ".Designator" at -4.511,-0.453 h2
3D body "SOIC8_208_EIAJ_EDR_7320.x_t": height 2.01, standoff 0, extent -3.928,-2.615 4.022,2.595

## SOIC8_208_AND_SOIC16N [mm] "SOIC, 8-Leads, Body 4.50x4.50mm, Pitch 1.27mm, Thermal Pad 4.20x4.20mm, IPC Medium Density with SOIC 16-Leads, Body 10.29x7.49mm, Pitch 1.27mm, IPC Medium Density"
height 2.64
pads (24):
  oval 1.9x0.6 smd paste+0 mask+0.05: 1(-4.75,-3.175) 2(-4.75,-4.445) 3(4.75,-4.445) 4(4.75,-3.175) 5(4.75,3.175) 6(4.75,4.445) 8(-4.75,3.175) DNU(-4.75,-1.905) DNU(-4.75,-0.635) DNU(-4.75,0.635) DNU(-4.75,1.905) DNU(4.75,-1.905) DNU(4.75,-0.635) DNU(4.75,0.635) DNU(4.75,1.905)
  rect 0.6x1.5 smd paste+0 mask+0.05: 1(-1.9,-3.925)
  oval 0.6x1.5 smd paste+0 mask+0.05: 2(-0.63,-3.925) 3(0.64,-3.925) 4(1.91,-3.925) 5(1.91,3.943) 6(0.64,3.943) 7(-0.63,3.943) 8(-1.9,3.943)
  rect 1.9x0.6 smd paste+0 mask+0.05: 7(-4.75,4.445)
Top Overlay:
  circle w0.25: c-2.755,-4.175 r0.125
  circle w0.25: c-4.75,5.295 r0.125
  rectangle: -3.4,4.45 -2.6,5.25
  region: -2.4,-3 -2.4,-2.4 -3,-2.4 -3,-3
  lines w0.2: -5.65,-3.81 -3.4,-3.81 ; -5.65,-2.54 -3.4,-2.54 ; -5.65,-1.27 -3.4,-1.27 ; -5.65,0 -3.4,0 ; -5.65,1.27 -3.4,1.27 ; -5.65,2.54 -3.4,2.54 ; -5.65,3.81 -3.4,3.81 ; -2.475,-3 -3,-3 -3,3 -2.475,3 ; -1.265,-4.7 -1.265,-2.9 ; -1.265,2.918 -1.265,4.718 ; 0.005,-4.7 0.005,-2.9 ; 0.005,2.918 0.005,4.718 ; 1.275,-4.7 1.275,-2.9 ; 1.275,2.918 1.275,4.718 ; 2.475,-3 3,-3 3,3 2.475,3 ; 3.4,-3.81 5.65,-3.81 ; 3.4,-2.54 5.65,-2.54 ; 3.4,-1.27 5.65,-1.27 ; 3.4,0 5.65,0 ; 3.4,1.27 5.65,1.27 ; 3.4,2.54 5.65,2.54 ; 3.4,3.81 5.65,3.81 ; -3.4,-5.25 3.4,-5.25 3.4,5.25 -3.4,5.25 -3.4,-5.25
Top Courtyard:
  lines w0.025: -6.1,-5.65 -6.1,5.65 6.1,5.65 6.1,-5.65 -6.1,-5.65
Top Assembly:
  drawing of 169 lines, arcs and shapes, not listed
  text ".Designator" at -4.511,-0.453 h2
3D body "SOIC8_208_EIAJ_EDR_7320.x_t": height 2.01, standoff 0, extent -2.595,-3.928 2.615,4.022

## SOIC8_AND_SOT235 [mm] "SOIC, 8-Leads, Body 3.90x4.90mm, Pitch 1.27mm for EEPROM"
height 1.75
pads (13):
  rect 1.45x0.6 smd paste+0 mask+0.05: 1(-2.725,1.905)
  oval 1.45x0.6 smd paste+0 mask+0.05: 2(-2.725,0.635) 3(-2.725,-0.635) 4(-2.725,-1.905) 5(2.725,-1.905) 6(2.725,-0.635) 7(2.725,0.635) 8(2.725,1.905)
  oval 0.6x1.1 smd paste+0 mask+0.05: 4(0,-1.2) 5(0.95,-1.2) 7(-0.95,1.2) 8(0.95,1.2)
  rect 0.6x1.1 smd paste+0 mask+0.05: 6(-0.95,-1.2)
Top Overlay:
  circle w0.25: c-0.965,-2.184 r0.125
  circle w0.25: c-2.725,2.755 r0.125
  region: -1,2.7 -1.6,2.7 -1.6,2.1 -1,2.1
  lines w0.2: -3.556,-1.27 -1.601,-1.27 ; -3.556,0 -1.601,0 ; -3.556,1.27 -1.601,1.27 ; 1.601,-1.27 3.556,-1.27 ; 1.601,0 3.556,0 ; 1.601,1.27 3.556,1.27 ; -1.6,-2.7 1.6,-2.7 1.6,2.7 -1.6,2.7 -1.6,-2.7
Top Courtyard:
  lines w0.025: -3.95,-3.1 -3.95,3.1 3.95,3.1 3.95,-3.1 -3.95,-3.1
Top Assembly:
  drawing of 155 lines, arcs and shapes, not listed
  text ".Designator" at 0.453,-4.511 h2
3D body "SOIC8_JEDEC_MS012.x_t": height 1.43, standoff 0, extent -3,-2.45 3,2.45

## SOIC8_JEDEC_MS012AA [mm] "SOIC, 8-Leads, Body 3.90x4.90mm, Pitch 1.27mm"
height 1.75
pads (8):
  rect 1.45x0.6 smd paste+0 mask+0.05: 1(-2.725,1.905)
  oval 1.45x0.6 smd paste+0 mask+0.05: 2(-2.725,0.635) 3(-2.725,-0.635) 4(-2.725,-1.905) 5(2.725,-1.905) 6(2.725,-0.635) 7(2.725,0.635) 8(2.725,1.905)
Top Overlay:
  circle w0.25: c-2.725,2.755 r0.125
  rectangle: -1.7,1.7 -0.9,2.5
  lines w0.2: -3.556,-1.27 -1.601,-1.27 ; -3.556,0 -1.601,0 ; -3.556,1.27 -1.601,1.27 ; 1.601,-1.27 3.556,-1.27 ; 1.601,0 3.556,0 ; 1.601,1.27 3.556,1.27 ; -1.6,-2.5 1.6,-2.5 1.6,2.5 -1.6,2.5 -1.6,-2.5
Top Courtyard:
  lines w0.025: -3.95,-3.1 -3.95,3.1 3.95,3.1 3.95,-3.1 -3.95,-3.1
Top Assembly:
  drawing of 155 lines, arcs and shapes, not listed
  text ".Designator" at 0.453,-4.511 h2
3D body "SOIC8_JEDEC_MS012.x_t": height 1.43, standoff 0, extent -3,-2.45 3,2.45

## SOIC14_JEDEC_MS012AB [mm] "SOIC, 14-Leads, Body 3.90x8.65mm, Pitch 1.27mm"
height 1.75
pads (14):
  rect 1.45x0.6 smd paste+0 mask+0.05: 1(-2.725,3.81)
  oval 1.45x0.6 smd paste+0 mask+0.05: 2(-2.725,2.54) 3(-2.725,1.27) 4(-2.725,0) 5(-2.725,-1.27) 6(-2.725,-2.54) 7(-2.725,-3.81) 8(2.725,-3.81) 9(2.725,-2.54) 10(2.725,-1.27) 11(2.725,0) 12(2.725,1.27) 13(2.725,2.54) 14(2.725,3.81)
Top Overlay:
  circle w0.25: c-2.725,4.66 r0.125
  rectangle: -1.6,3.565 -0.8,4.365
  lines w0.2: -3.4,-3.175 -1.6,-3.175 ; -3.4,-1.905 -1.6,-1.905 ; -3.4,-0.635 -1.6,-0.635 ; -3.4,0.635 -1.6,0.635 ; -3.4,1.905 -1.6,1.905 ; -3.4,3.175 -1.6,3.175 ; -1.6,-4.365 1.6,-4.365 ; -1.6,-4.35 -1.6,4.365 1.6,4.365 1.6,-4.35 ; 1.6,-3.175 3.4,-3.175 ; 1.6,-1.905 3.4,-1.905 ; 1.6,-0.635 3.4,-0.635 ; 1.6,0.635 3.4,0.635 ; 1.6,1.905 3.4,1.905 ; 1.6,3.175 3.4,3.175
Top Courtyard:
  lines w0.025: -3.8,-4.75 -3.8,4.75 3.8,4.75 3.8,-4.75 -3.8,-4.75
Top Assembly:
  drawing of 252 lines, arcs and shapes, not listed
  text ".Designator" at 0.453,-4.511 h2
3D body "SOIC14_JEDEC_MS012.x_t": height 1.43, standoff 0, extent -3,-4.325 3,4.325